# Altium footprint library QFN50P400X400X80-25N.PcbLib: 1 footprints
Each footprint in its own frame and in the unit in brackets; x right, y up, seen from the top. Pads: shape width x height; smd on the part's side, far side on the other; paste and mask are expansions set on the pad; w line width, h text height; cw(c..) or ccw(c..) is an arc to the next point about the centre after c.
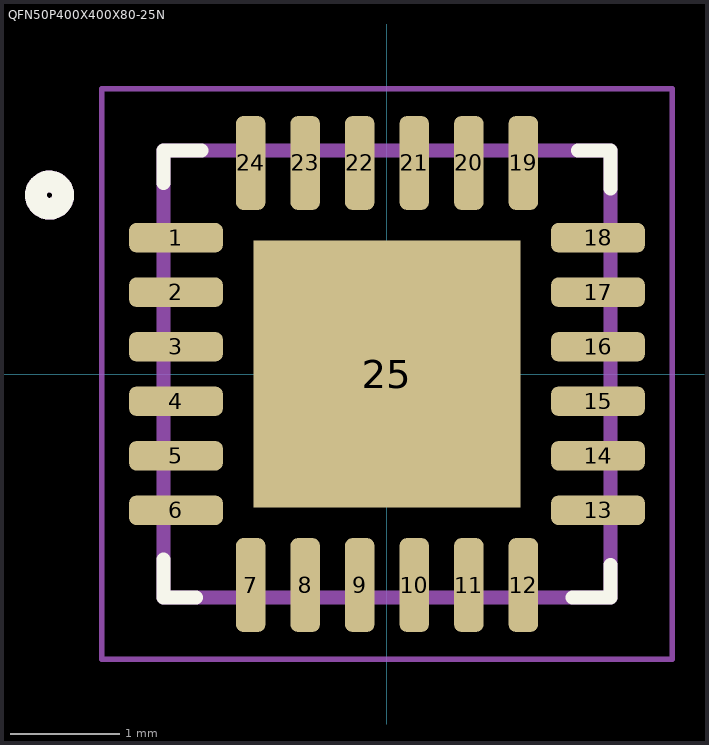
[diagram p0: the footprint, top view; thin cyan lines are the x and y axes]

## QFN50P400X400X80-25N [mm]
pads (25):
  rrect50% 0.86x0.27 smd paste+0 mask+0.102: 1(-1.935,1.25) 2(-1.935,0.75) 3(-1.935,0.25) 4(-1.935,-0.25) 5(-1.935,-0.75) 6(-1.935,-1.25) 13(1.935,-1.25) 14(1.935,-0.75) 15(1.935,-0.25) 16(1.935,0.25) 17(1.935,0.75) 18(1.935,1.25)
  rrect50% 0.27x0.86 smd paste+0 mask+0.102: 7(-1.25,-1.935) 8(-0.75,-1.935) 9(-0.25,-1.935) 10(0.25,-1.935) 11(0.75,-1.935) 12(1.25,-1.935) 19(1.25,1.935) 20(0.75,1.935) 21(0.25,1.935) 22(-0.25,1.935) 23(-0.75,1.935) 24(-1.25,1.935)
  rect 2.45x2.45 smd paste-2 mask+0.102: 25(0,0)
Top Overlay:
  circle w0.2: c-3.095,1.64 r0.125
  lines w0.127: -2.05,-1.7 -2.05,-2.05 -1.75,-2.05 ; -2.05,1.75 -2.05,2.05 -1.7,2.05 ; 1.7,-2.05 2.05,-2.05 2.05,-1.75 ; 1.75,2.05 2.05,2.05 2.05,1.7
Top Paste:
  region: 0.99,-0.99 0.12,-0.99 0.12,-0.12 0.99,-0.12
  region: -0.12,-0.99 -0.99,-0.99 -0.99,-0.12 -0.12,-0.12
  region: -0.12,0.12 -0.99,0.12 -0.99,0.99 -0.12,0.99
  region: 0.99,0.12 0.12,0.12 0.12,0.99 0.99,0.99
Assembly Top:
  circle w0.2: c-3.095,1.64 r0.125
  lines w0.127: -2.05,-2.05 -2.05,2.05 2.05,2.05 2.05,-2.05 -2.05,-2.05
Courtyard Top:
  lines w0.05: -2.615,-2.615 -2.615,2.615 2.615,2.615 2.615,-2.615 -2.615,-2.615
3D body "step_temp.STEP": height 0.8, standoff 0, extent -2,-2.5 2,2.5